# Altium footprint library KM_ALTIUM.PcbLib: 265 footprints (part 3 of 17)
Each footprint in its own frame and in the unit in brackets; x right, y up, seen from the top. Pads: shape width x height; smd on the part's side, far side on the other; paste and mask are expansions set on the pad; w line width, h text height; cw(c..) or ccw(c..) is an arc to the next point about the centre after c.
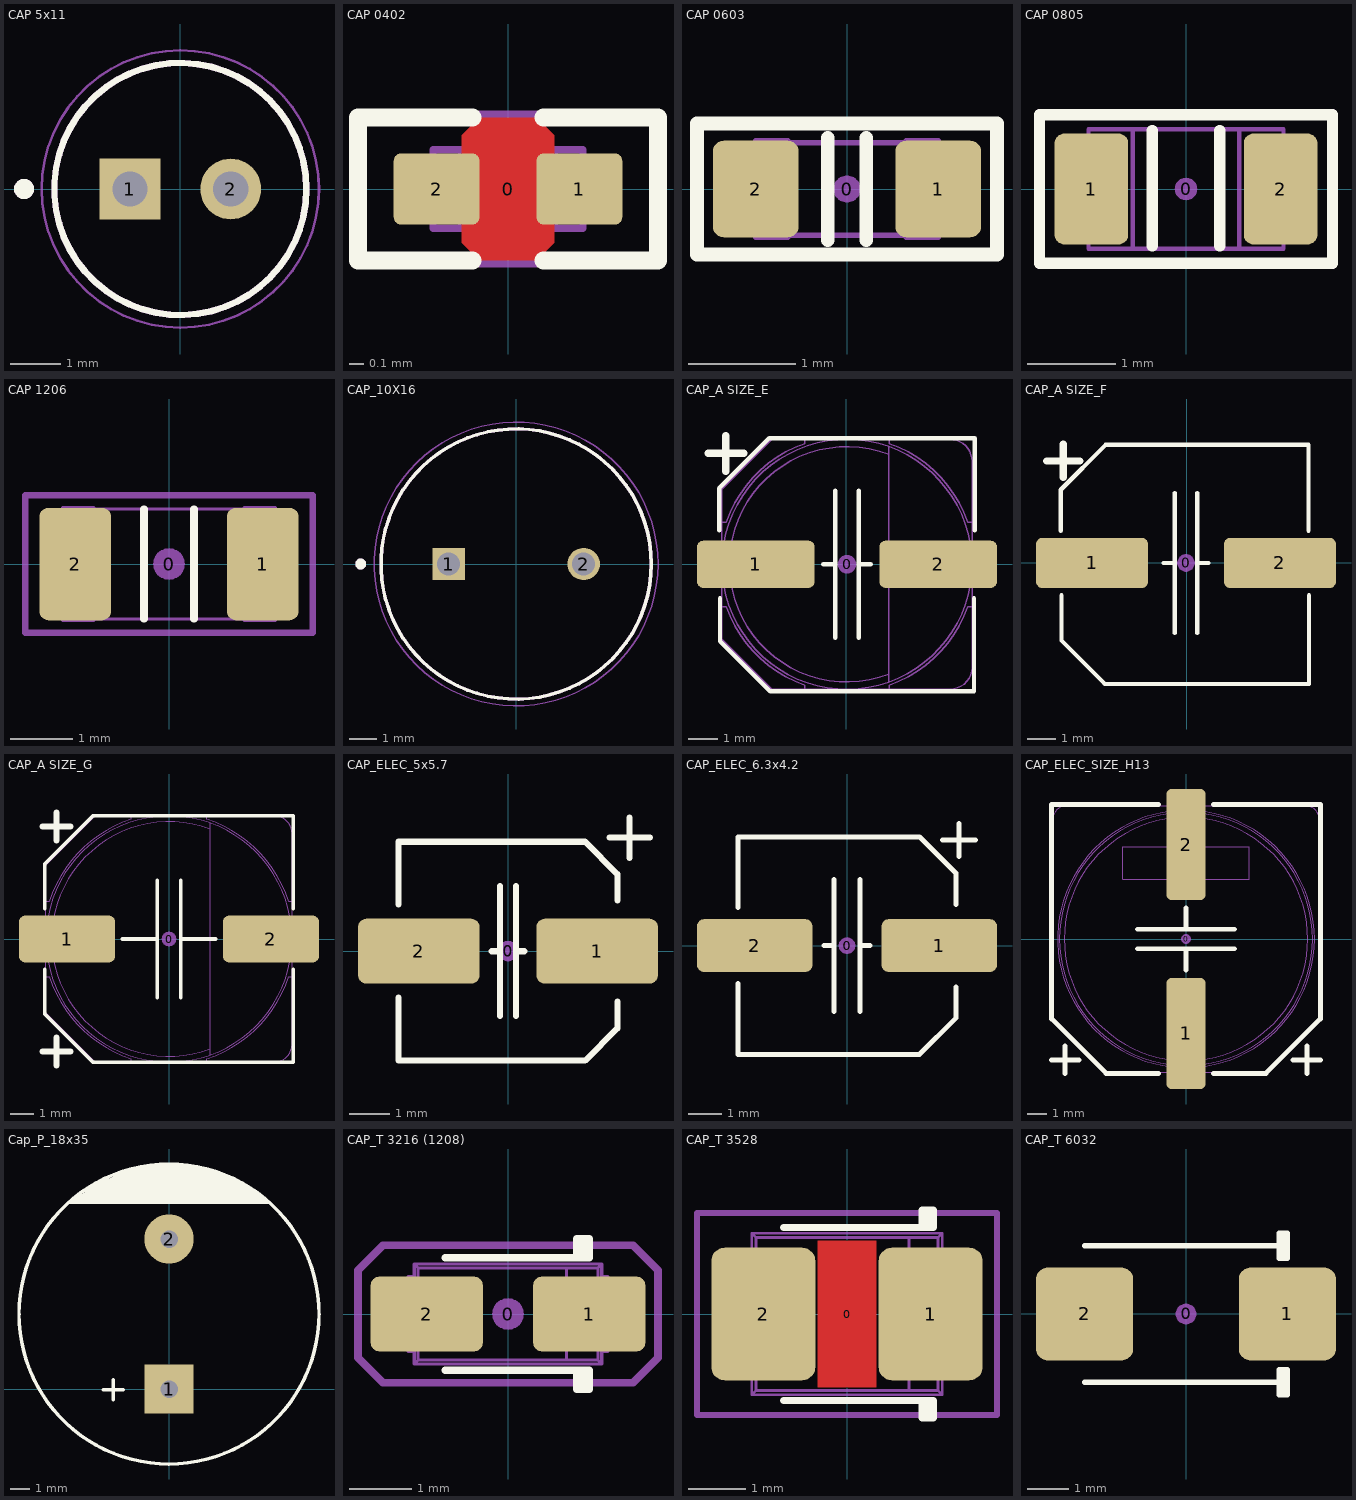
[diagram p2: the footprints below, top view; thin cyan lines are the x and y axes]

## CAP 5x11 [mm]
height 12.5
pads (2):
  rect 1.208x1.208 / inner round 1.208 / far side rect 1.208x1.208 hole 0.7: 1(-1,0)
  round 1.208 hole 0.7: 2(1,0)
Top Overlay:
  circle w0.2: c-3.1,0 r0.1
  circle w0.127: c0,0 r2.5
Mechanical 13:
  circle w0.2: c-3.1,0 r0.1
  circle w0.127: c0,0 r2.5
Mechanical 15:
  circle w0.05: c0,0 r2.75
3D body "step_temp.STEP": height 12.5, standoff -19, extent -2.5,-2.499 2.5,2.499

## CAP 0402 [mm]
pads (3):
  round 0.2 on Mech15: 0(0,0)
  rrect20% 0.6x0.5 smd: 1(0.5,0) 2(-0.5,0)
Top Layer:
  pour cut-out: 0.325,-0.375 0.2,-0.5 -0.2,-0.5 -0.325,-0.375 -0.325,0.375 -0.2,0.5 0.2,0.5 0.325,0.375
Top Overlay:
  lines w0.127: -0.25,-0.5 -1.05,-0.5 -1.05,0.5 -0.25,0.5 ; 0.25,-0.5 1.05,-0.5 1.05,0.5 0.25,0.5
Mechanical 13:
  lines w0.05: -0.325,-0.255 0.325,-0.255 ; -0.325,0.255 0.325,0.255 ; -0.525,-0.275 -0.325,-0.275 -0.325,0.275 -0.525,0.275 -0.525,-0.275 ; 0.325,-0.275 0.325,0.275 0.525,0.275 0.525,-0.275 0.325,-0.275
Mechanical 15:
  lines w0.1: -1.05,-0.5 -1.05,0.5 1.05,0.5 1.05,-0.5 -1.05,-0.5
3D body "CAP 0402 (1005 metric).STEP": height 0.55, standoff 0, extent -0.525,-0.275 0.525,0.275

## CAP 0603 [mm]
pads (3):
  round 0.254 on Mech15: 0(0,0)
  rrect25% 0.8x0.9 smd: 1(0.85,0) 2(-0.85,0)
Top Overlay:
  lines w0.127: -0.178,-0.476 -0.178,0.476 ; 0.178,-0.476 0.178,0.476 ; -1.397,-0.61 1.397,-0.61 1.397,0.61 -1.397,0.61 -1.397,-0.61
Mechanical 13:
  lines w0.05: -0.55,-0.43 0.55,-0.43 ; -0.55,0.43 0.55,0.43 ; -0.85,-0.45 -0.85,0.45 -0.55,0.45 -0.55,-0.45 -0.85,-0.45 ; 0.55,-0.45 0.85,-0.45 0.85,0.45 0.55,0.45 0.55,-0.45
Mechanical 15:
  lines w0.1: -1.397,-0.61 -1.397,0.61 1.397,0.61 1.397,-0.61 -1.397,-0.61
3D body "CAP_0603.STEP": height 0.89, standoff -0.01, extent -0.85,-0.45 0.85,0.45

## CAP 0805 [mm]
pads (3):
  round 0.254 on Mech15: 0(0,0)
  rrect25% 0.83x1.25 smd: 1(-1.067,0) 2(1.067,0)
Top Overlay:
  lines w0.127: -0.381,-0.642 -0.381,0.66 ; 0.381,-0.642 0.381,0.66 ; -1.651,-0.838 1.651,-0.838 1.651,0.838 -1.651,0.838 -1.651,-0.838
Mechanical 13:
  lines w0.05: 0.6,-0.674 -0.6,-0.674 ; -0.6,-0.674 0.6,-0.674 ; -0.6,-0.675 -1.1,-0.675 -1.1,0.675 -0.6,0.675 -0.6,-0.675 ; 0.6,-0.675 1.1,-0.675 1.1,0.675 0.6,0.675 ; 0.6,-0.675 0.6,0.675 ; 0.6,0.674 -0.6,0.674 0.6,0.674
Mechanical 15:
  lines w0.1: -1.651,-0.85 -1.651,0.85 1.651,0.85 1.651,-0.85 -1.651,-0.85
3D body "C0805-0.80.step": height 0.81, standoff 0, extent -0.9,-0.635 0.9,0.635

## CAP 1206 [mm]
pads (3):
  round 0.508 on Mech15: 0(0,0)
  rrect25% 1.15x1.8 smd: 1(1.5,0) 2(-1.5,0)
Top Overlay:
  lines w0.127: -0.4,-0.876 -0.4,0.876 ; 0.4,-0.876 0.4,0.876
Mechanical 13:
  lines w0.05: -1.2,-0.88 1.2,-0.88 ; -1.2,0.88 1.2,0.88 ; -1.7,-0.9 -1.2,-0.9 -1.2,0.9 -1.7,0.9 -1.7,-0.9 ; 1.2,-0.9 1.7,-0.9 1.7,0.9 1.2,0.9 1.2,-0.9
Mechanical 15:
  lines w0.1: -2.3,-1.1 -2.3,1.1 2.3,1.1 2.3,-1.1 -2.3,-1.1
3D body "CAPC3216X180N - 1206 (3216 metric).STEP": height 1.8, standoff 0, extent -1.7,-0.9 1.7,0.9

## CAP_10X16 [mm]
pads (2):
  rect 1.2x1.2 hole 0.85: 1(-2.5,0)
  round 1.2 hole 0.85: 2(2.5,0)
Top Overlay:
  circle w0.2: c-5.75,0 r0.1
  circle w0.127: c0,0 r5
Mechanical 13:
  circle w0.2: c-5.75,0 r0.1
  circle w0.127: c0,0 r5
Mechanical 15:
  circle w0.05: c0,0 r5.25
3D body "step_temp.STEP": height 16, standoff -17, extent -5,-4.999 5,4.999

## CAP_A SIZE_E [mm]
pads (3):
  round 0.635 on Mech15: 0(0.025,0)
  rrect25% 4x1.6 smd: 1(-3.075,0) 2(3.125,0)
Top Overlay:
  lines w0.152: -4.318,1.15 -4.318,2.591 -2.616,4.293 4.369,4.293 4.369,1.15 ; -4.293,-1.15 -4.293,-2.616 -2.591,-4.318 4.343,-4.318 4.343,-1.15 ; -0.775,0 -0.375,0 ; -0.375,-2.5 -0.375,2.5 ; 0.425,-2.5 0.425,2.5 ; 0.425,0 0.825,0
  lines w0.254: -4.689,3.769 -3.489,3.769 ; -4.089,3.169 -4.089,4.369
Mechanical 13:
  lines w0.05: -4.225,-1.436 -4.081,-1.436 ccw(c0.025,0) -1.411,-4.106 -1.411,-4.25 ; -4.225,-0.325 -4.725,-0.325 -4.725,0.325 -4.225,0.325 ; -4.225,1.436 -4.081,1.436 cw(c0.025,0) -1.411,4.106 -1.411,4.25 ; 1.442,-4.005 ccw(c0.025,0) 1.442,4.005 ; 1.442,-3.741 cw(c0.025,0) 1.442,3.741 ; 1.462,-4.25 1.462,-4.106 ccw(c0.025,0) 4.131,-1.436 4.275,-1.436 ; 1.462,4.25 1.462,4.106 cw(c0.025,0) 4.131,1.436 4.275,1.436 ; 4.275,-0.325 4.775,-0.325 4.775,0.325 4.275,0.325 ; -4.225,-2.55 -2.525,-4.25 3.525,-4.25 ccw(c3.525,-3.5) 4.275,-3.5 4.275,3.5 ccw(c3.525,3.5) 3.525,4.25 -2.525,4.25 -4.225,2.55 -4.225,-2.55 ; 1.442,-4.007 cw(c0.025,0) 1.442,4.007 1.442,-4.007
3D body "SW3dPS-capacitor size E.STEP": height 6.22, standoff 0.01, extent -4.5,-4.175 4.5,4.125

## CAP_A SIZE_F [mm]
pads (3):
  round 0.635 on Mech15: 0(-0.025,0)
  rrect25% 4x1.8 smd: 1(-3.379,0) 2(3.329,0)
Top Overlay:
  lines w0.152: -4.496,1.15 -4.496,2.616 -2.896,4.216 4.343,4.216 4.343,1.15 ; -4.47,-1.15 -4.47,-2.769 -2.921,-4.318 4.369,-4.318 4.369,-1.15 ; -0.825,0 -0.425,0 ; -0.425,-2.5 -0.425,2.5 ; 0.375,-2.5 0.375,2.5 ; 0.375,0 0.775,0
  lines w0.254: -5.006,3.644 -3.806,3.644 ; -4.406,3.044 -4.406,4.244
3D body "SW3dPS-capacitor size F.STEP": height 10.22, standoff 0.01, extent -5.001,-4.201 4.899,4.099

## CAP_A SIZE_G [mm]
pads (3):
  round 0.635 on Mech15: 0(0,0)
  rrect25% 4.1x2 smd: 1(-4.35,0) 2(4.35,0)
Top Overlay:
  lines w0.152: -5.3,-1.3 -5.3,-3.2 -3.242,-5.258 5.3,-5.258 5.3,-1.3 ; -5.3,1.3 -5.3,3.2 -3.242,5.258 5.3,5.258 5.3,1.3 ; -2,0 -0.5,0 ; -0.5,-2.5 -0.5,2.5 ; 0.5,-2.5 0.5,2.5 ; 0.5,0 2,0
  lines w0.254: -5.4,-4.8 -4.2,-4.8 ; -5.4,4.8 -4.2,4.8 ; -4.8,-5.4 -4.8,-4.2 ; -4.8,4.2 -4.8,5.4
Mechanical 13:
  lines w0.05: -5.25,-1.601 -5.105,-1.601 ccw(c0,0) -1.601,-5.105 -1.601,-5.25 ; -5.25,-0.45 -6,-0.45 -6,0.45 -5.25,0.45 ; -5.25,1.601 -5.105,1.601 cw(c0,0) -1.601,5.105 -1.601,5.25 ; 1.601,-5.25 1.601,-5.105 ccw(c0,0) 5.105,-1.601 5.25,-1.601 ; 1.601,5.25 1.601,5.105 cw(c0,0) 5.105,1.601 5.25,1.601 ; 1.75,-4.948 ccw(c0,0) 1.75,4.948 ; 1.75,-4.684 cw(c0,0) 1.75,4.684 ; 5.25,-0.45 6,-0.45 6,0.45 5.25,0.45 ; -5.25,-3.15 -5.25,3.15 -3.15,5.25 4.5,5.25 cw(c4.5,4.5) 5.25,4.5 5.25,-4.5 cw(c4.5,-4.5) 4.5,-5.25 -3.15,-5.25 -5.25,-3.15 ; 1.75,-4.95 cw(c0,0) 1.75,4.95 1.75,-4.95
3D body "SW3dPS-capacitor size G.STEP": height 10.22, standoff 0.01, extent -5.8,-5.176 5.8,5.124

## CAP_ELEC_5x5.7 [mm] "Capacitor, polarized, aluminum can; 5x5.7mm DxH"
height 5.7
pads (3):
  round 0.508 on Mech15: 0(0,0)
  rrect25% 3x1.6 smd: 1(2.2,0) 2(-2.2,0)
Top Overlay:
  lines w0.152: -2.7,-1.15 -2.7,-2.7 1.9,-2.7 2.7,-1.9 2.7,-1.25 ; -2.7,1.15 -2.7,2.7 1.9,2.7 2.7,1.9 2.7,1.25 ; -0.4,0 -0.2,0 ; -0.2,-1.6 -0.2,1.6 ; 0.2,-1.6 0.2,1.6 ; 0.2,0 0.4,0 ; 2.5,2.8 3,2.8 3.5,2.8 ; 3,2.3 3,3.3
3D body "Cap, elec, 5x5.7_.STEP": height 5.7, standoff 0, extent -2.65,-2.65 2.65,2.65

## CAP_ELEC_6.3x4.2 [mm] "Capacitor, polarized, aluminum can; 6.3x4.2mm DxH"
height 4.2
pads (3):
  round 0.508 on Mech15: 0(0,0)
  rrect25% 3.5x1.6 smd: 1(2.8,0) 2(-2.8,0)
Top Overlay:
  lines w0.152: -3.3,-1.15 -3.3,-3.3 2.2,-3.3 3.3,-2.2 3.3,-1.25 ; -3.3,1.15 -3.3,3.3 2.2,3.3 3.3,2.2 3.3,1.25 ; -0.7,0 -0.5,0 ; -0.4,-2 -0.4,2 ; 0.4,-2 0.4,2 ; 0.5,0 0.7,0 ; 2.9,3.2 3.4,3.2 3.9,3.2 ; 3.4,2.7 3.4,3.7
3D body "Cap, elec, 6.3x4.2.STEP": height 4.23, standoff 0, extent -3.3,-3.3 3.3,3.3

## CAP_ELEC_SIZE_H13 [mm] "Capacitor, polarized, aluminum can; 12.5x13.5mm DxH"
height 13.5
pads (3):
  round 0.508 on Mech15: 0(0,0)
  rrect25% 2x5.7 smd: 1(0,-4.85) 2(0,4.85)
Top Overlay:
  lines w0.254: -6.9,-6.2 -5.5,-6.2 ; -6.2,-6.9 -6.2,-5.5 ; -2.5,-0.5 2.5,-0.5 ; -2.5,0.5 2.5,0.5 ; -1.4,-6.9 -4.1,-6.9 -6.9,-4.1 -6.9,6.9 -1.4,6.9 ; 0,-1.6 0,-0.5 ; 0,0.5 0,1.6 ; 1.4,-6.9 4.1,-6.9 6.9,-4.1 6.9,6.9 1.4,6.9 ; 5.5,-6.2 6.9,-6.2 ; 6.2,-6.9 6.2,-5.5
Mechanical 13:
  circle w0.05: c0,0 r6.6
  circle w0.05: c0,0 r6.5
  circle w0.05: c0,0 r6.25
  lines w0.05: -0.45,-6.85 -0.45,-7.5 0.45,-7.5 0.45,-6.85 ; -0.45,6.85 -0.45,7.5 0.45,7.5 0.45,6.85 ; -6.85,-4.11 -4.11,-6.85 4.11,-6.85 6.85,-4.11 6.85,6.1 ccw(c6.1,6.1) 6.1,6.85 -6.1,6.85 ccw(c-6.1,6.1) -6.85,6.1 -6.85,-4.11 ; -3.25,3.055 -3.25,4.745 3.25,4.745 3.25,3.055 -3.25,3.055
3D body "CAP Alum Elec Size H13.STEP": height 14, standoff 0, extent -6.85,-7.5 6.85,7.5

## Cap_P_18x35 [mm]
pads (2):
  rect 2.5x2.5 hole 0.889: 1(0,0)
  round 2.5 hole 0.889: 2(0,7.62)
Top Overlay:
  circle w0.178: c0,3.81 r7.62
  region: -2.845,10.795 -2.438,10.998 -2.007,11.227 -0.991,11.354 0.229,11.43 0.864,11.405 1.753,11.227 2.921,10.897 4.343,10.084 4.851,9.703 5.156,9.423 -5.08,9.423 -4.635,9.766 -4.267,10.033 -3.886,10.363
  lines w0.178: -3.353,-0.025 -2.337,-0.025 ; -2.845,-0.533 -2.845,0.483
3D body "User Library-Cap electrolitic radial 18x35.STEP": height 35.8, standoff -0.7, extent -9.05,-5.187 8.946,12.807

## CAP_T 3216 (1208) [mm]
pads (3):
  round 0.508 on Mech15: 0(0,0)
  rrect25% 1.8x1.2 smd: 1(1.3,0) 2(-1.3,0)
Top Overlay:
  lines w0.127: -1,-0.9 1.3,-0.9 1.3,-1.2 1.1,-1.2 1.1,-0.9 ; -1,0.9 1.3,0.9 1.3,1.2 1.1,1.2 1.1,0.9 ; 1.2,-1.2 1.2,-0.9 ; 1.2,0.9 1.2,1.2
Mechanical 13:
  lines w0.05: -1.6,-0.36 -1.499,-0.36 ; -1.6,0.36 -1.499,0.36 ; -1.499,-0.6 -1.6,-0.6 -1.6,0.6 -1.499,0.6 ; 0.937,-0.737 0.937,0.737 ; 1.499,-0.6 1.6,-0.6 1.6,0.6 1.499,0.6 ; 1.499,-0.36 1.6,-0.36 ; 1.499,0.36 1.6,0.36 ; -1.5,-0.8 1.5,-0.8 ; -1.5,-0.8 -1.5,0.8 ; -1.5,-0.8 -1.437,-0.737 ; -1.5,0.8 1.5,0.8 ; -1.5,0.8 -1.437,0.737 ; -1.437,-0.737 -1.437,0.737 ; -1.437,-0.737 1.437,-0.737 ; -1.437,0.737 1.437,0.737 ; 1.437,-0.737 1.5,-0.8 ; 1.437,-0.737 1.437,0.737 ; 1.437,0.737 1.5,0.8 ; 1.5,-0.8 1.5,0.8
Mechanical 15:
  lines w0.127: -2.4,-0.7 -2,-1.1 2,-1.1 2.4,-0.7 2.4,0.7 2,1.1 -2,1.1 -2.4,0.7 -2.4,-0.7
3D body "CAPMP3216X180N.STEP": height 1.8, standoff 0, extent -1.6,-0.8 1.6,0.8

## CAP_T 3528 [mm]
pads (3):
  round 0.254 on Mech15: 0(0,0)
  rrect25% 1.8x2.3 smd: 1(1.45,0) 2(-1.45,0)
Top Layer:
  pour cut-out: 0.508,-1.27 -0.508,-1.27 -0.508,1.27 0.508,1.27
Top Overlay:
  lines w0.127: -1.1,-1.5 1.5,-1.5 1.5,-1.8 1.3,-1.8 1.3,-1.5 ; -1.1,1.5 1.5,1.5 1.5,1.8 1.3,1.8 1.3,1.5 ; 1.4,-1.8 1.4,-1.5 ; 1.4,1.5 1.4,1.8
Mechanical 13:
  lines w0.05: -1.75,-0.55 -1.65,-0.55 ; -1.75,0.55 -1.65,0.55 ; -1.65,-1.1 -1.75,-1.1 -1.75,1.1 -1.65,1.1 ; 1.077,-1.327 1.077,1.327 ; 1.65,-1.1 1.75,-1.1 1.75,1.1 1.65,1.1 ; 1.65,-0.55 1.75,-0.55 ; 1.65,0.55 1.75,0.55 ; -1.65,-1.4 -1.65,1.4 ; -1.65,-1.4 -1.577,-1.327 ; -1.65,-1.4 1.65,-1.4 ; -1.65,1.4 1.65,1.4 ; -1.65,1.4 -1.577,1.327 ; -1.577,-1.327 -1.577,1.327 ; -1.577,-1.327 1.577,-1.327 ; -1.577,1.327 1.577,1.327 ; 1.577,-1.327 1.65,-1.4 ; 1.577,-1.327 1.577,1.327 ; 1.577,1.327 1.65,1.4 ; 1.65,-1.4 1.65,1.4
Mechanical 15:
  lines w0.1: -2.6,-1.75 2.6,-1.75 2.6,1.75 -2.6,1.75 -2.6,-1.75
3D body "CAPMP3528X210N.STEP": height 2.1, standoff 0, extent -1.75,-1.4 1.75,1.4

## CAP_T 6032 [mm]
pads (3):
  round 0.508 on Mech15: 0(0,0)
  rrect25% 2.35x2.25 smd: 1(2.45,0) 2(-2.45,0)
Top Overlay:
  lines w0.127: -2.45,-1.65 2.45,-1.65 ; -2.45,1.65 2.45,1.65 ; 2.35,-1.95 2.35,-1.65 2.35,-1.35 ; 2.35,1.35 2.35,1.65 2.35,1.95 ; 2.25,-1.95 2.45,-1.95 2.45,-1.35 2.25,-1.35 2.25,-1.65 2.25,-1.95 ; 2.25,1.35 2.45,1.35 2.45,1.95 2.25,1.95 2.25,1.65 2.25,1.35
3D body: height 2.8, standoff 0, extent -3,-1.6 3,1.6